# Altium footprint library standard-case.PcbLib: 285 footprints (part 5 of 18)
Each footprint in its own frame and in the unit in brackets; x right, y up, seen from the top. Pads: shape width x height; smd on the part's side, far side on the other; paste and mask are expansions set on the pad; w line width, h text height; cw(c..) or ccw(c..) is an arc to the next point about the centre after c.
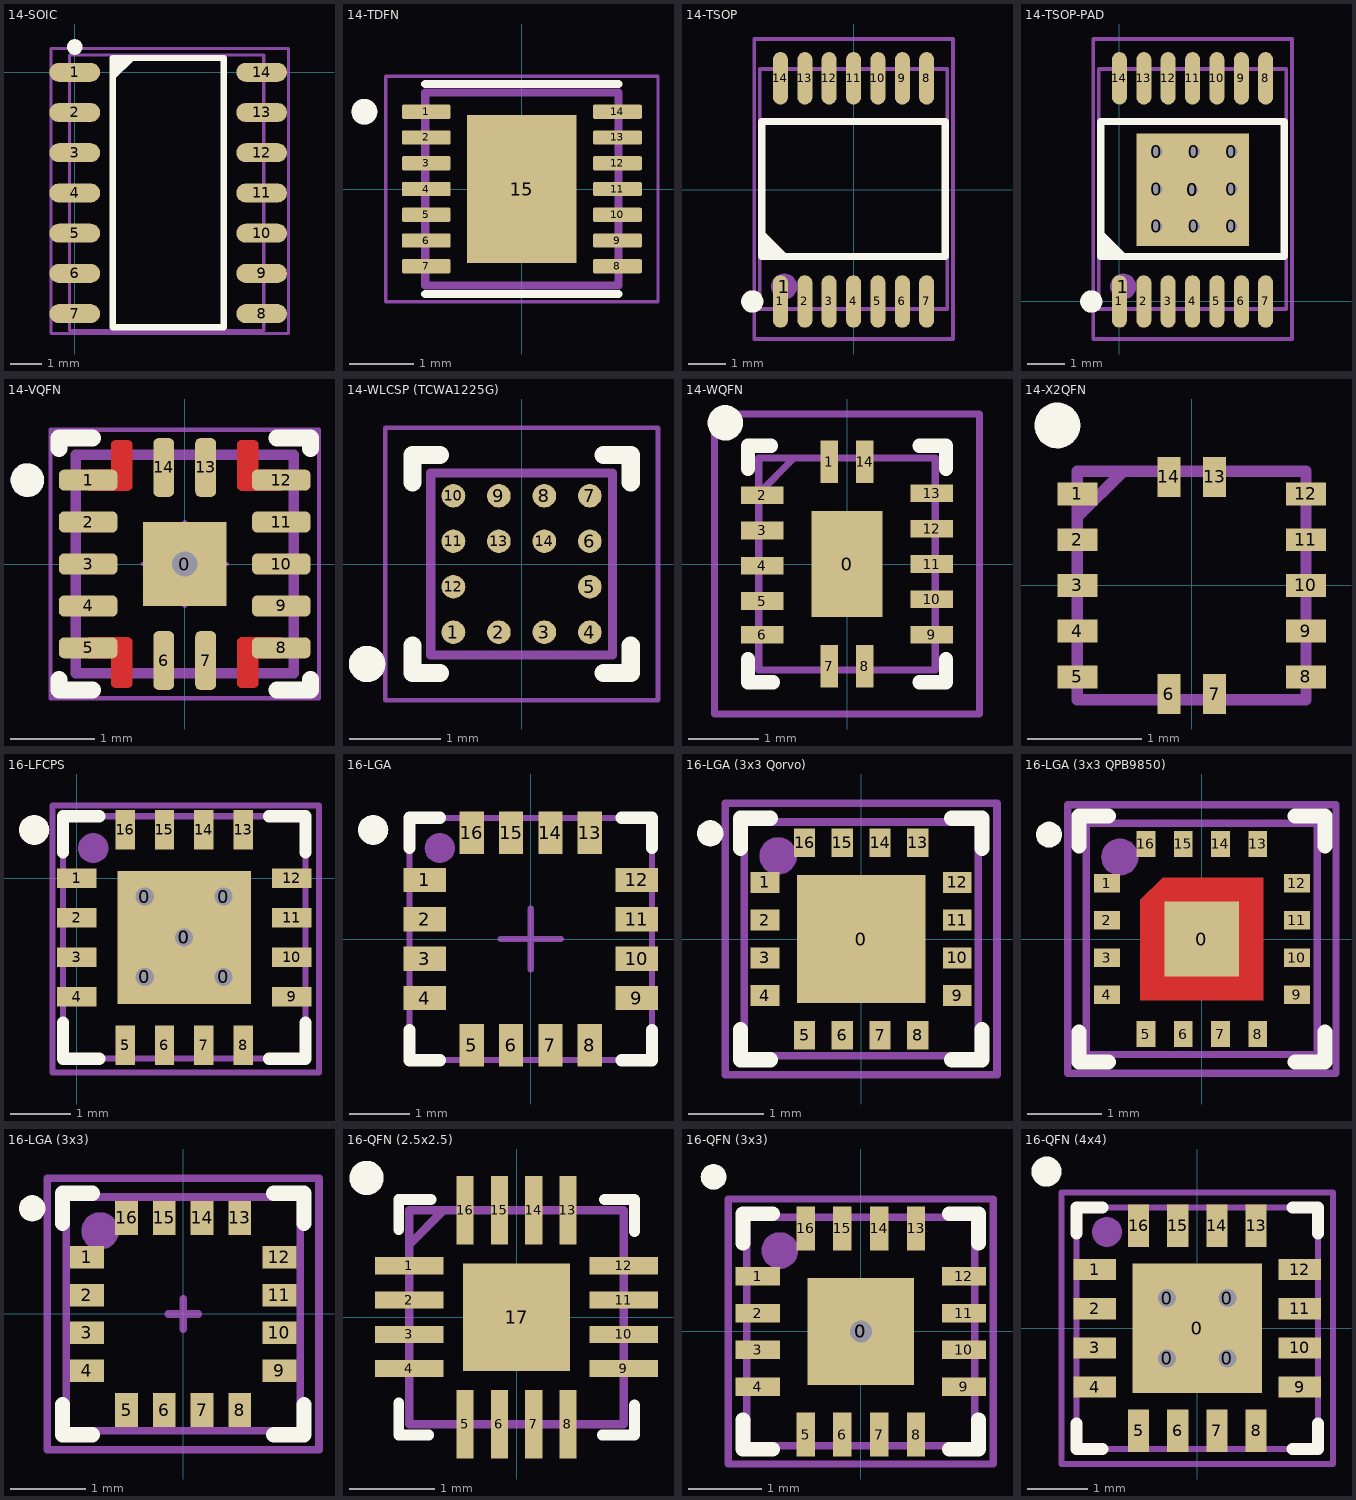
[diagram p4: the footprints below, top view; thin cyan lines are the x and y axes]

## 14-SOIC [mm] "pitch 1.27 mm"
pads (16):
  rrect100% 1.6x0.6 smd: 1(0,0) 2(0,-1.27) 3(0,-2.54) 4(0,-3.81) 5(0,-5.08) 6(0,-6.35) 7(0,-7.62) 8(5.9,-7.62) 9(5.9,-6.35) 10(5.9,-5.08) 11(5.9,-3.81) 12(5.9,-2.54) 13(5.9,-1.27) 14(5.9,0)
  rrect100% 0.5x0.5 on Top Overlay: ""(0,0.8)
  round 0.5 on Mech1: ""(0.5,0)
Top Overlay:
  region: 1.2,0.45 1.2,-0.27 1.92,0.45
  lines w0.2: 1.2,-8.05 4.7,-8.05 4.7,0.45 1.2,0.45 1.2,-8.05
Mechanical 1:
  lines w0.1: -0.168,-8.15 -0.168,0.55 5.969,0.55 5.969,-8.15 -0.168,-8.15
Mechanical 15:
  lines w0.1: -0.75,-8.25 -0.75,0.75 6.75,0.75 6.75,0.5 6.75,-8.25 -0.75,-8.25
3D body "User Library-so14-2.STEP": height 1.78, standoff 0.01, extent -0.118,-8.15 6.019,0.55

## 14-TDFN [mm]
pads (15):
  rrect25% 0.76x0.22 smd: 1(-1.485,1.2) 2(-1.485,0.8) 3(-1.485,0.4) 4(-1.485,0) 5(-1.485,-0.4) 6(-1.485,-0.8) 7(-1.485,-1.2) 8(1.485,-1.2) 9(1.485,-0.8) 10(1.485,-0.4) 11(1.485,0) 12(1.485,0.4) 13(1.485,0.8) 14(1.485,1.2)
  rect 1.7x2.3 smd paste-2: 15(0,0)
Top Overlay:
  circle w0.2: c-2.445,1.2 r0.1
  lines w0.127: -1.5,-1.63 1.5,-1.63 ; -1.5,1.63 1.5,1.63
Top Paste:
  region: 0.54,-0.73 -0.54,-0.73 -0.54,0.73 0.54,0.73
Mechanical 13:
  circle w0.2: c-2.445,1.2 r0.1
  lines w0.127: -1.5,-1.5 1.5,-1.5 1.5,1.5 -1.5,1.5 -1.5,-1.5
Mechanical 15:
  lines w0.05: -2.115,-1.75 2.115,-1.75 2.115,1.75 -2.115,1.75 -2.115,-1.75
3D body "TDFN.STEP": height 0.8, standoff 0, extent -1.5,-1.5 1.5,1.5

## 14-TSOP [mm]
pads (16):
  rrect100% 0.4x1.4 smd: 1(-1.95,-2.975) 2(-1.3,-2.975) 3(-0.65,-2.975) 4(0,-2.975) 5(0.65,-2.975) 6(1.3,-2.975) 7(1.95,-2.975) 8(1.95,2.975) 9(1.3,2.975) 10(0.65,2.975) 11(0,2.975) 12(-0.65,2.975) 13(-1.3,2.975) 14(-1.95,2.975)
  round 0.7 on Mech1: 1(-1.85,-2.575)
  round 0.6 on Top Overlay: ""(-2.7,-2.975)
Top Overlay:
  region: -2.45,-1.775 -1.73,-1.775 -2.45,-1.055
  lines w0.2: -2.45,-1.775 2.45,-1.775 2.45,1.825 -2.45,1.825 -2.45,-1.775
Mechanical 1:
  lines w0.1: -2.5,3.225 2.5,3.225 2.5,-3.175 -2.5,-3.175 -2.5,3.225 ; -2.5,3.225 -2.5,3.225
Mechanical 15:
  lines w0.1: -2.65,-3.975 2.65,-3.975 2.65,-0.575 2.65,4.025 -2.65,4.025 -2.65,-3.975
3D body "SW3dPS-TSSOP14-1.STEP": height 1.1, standoff 0, extent -2.5,-3.175 2.5,3.225

## 14-TSOP-PAD [mm] "pitch 0.65 mm, power pad"
pads (26):
  round 0.7 hole 0.3: 0(1,2) 0(1,3) 0(1,4) 0(1.95,2.975) 0(2,2) 0(2,4) 0(3,2) 0(3,3) 0(3,4)
  rect 3x3 smd: 0(1.95,2.975)
  rrect100% 0.4x1.4 smd: 1(0,0) 2(0.65,0) 3(1.3,0) 4(1.95,0) 5(2.6,0) 6(3.25,0) 7(3.9,0) 8(3.9,5.95) 9(3.25,5.95) 10(2.6,5.95) 11(1.95,5.95) 12(1.3,5.95) 13(0.65,5.95) 14(0,5.95)
  round 0.7 on Mech1: 1(0.1,0.4)
  round 0.6 on Top Overlay: ""(-0.75,0)
Top Overlay:
  region: -0.5,1.2 0.22,1.2 -0.5,1.92
  lines w0.2: -0.5,1.2 4.4,1.2 4.4,4.8 -0.5,4.8 -0.5,1.2
Mechanical 1:
  lines w0.1: -0.55,6.2 -0.55,6.2 ; -0.55,6.2 4.45,6.2 4.45,-0.2 -0.55,-0.2 -0.55,6.2
Mechanical 15:
  lines w0.1: -0.7,-1 -0.7,7 4.6,7 4.6,2.4 4.6,-1 -0.7,-1
3D body "SW3dPS-TSSOP14-1.STEP": height 1.1, standoff 0, extent -0.55,-0.2 4.45,6.2

## 14-VQFN [mm]
pads (15):
  rect 1x1 smd: 0(0,0)
  rrect50% 0.7x0.25 smd: 1(-1.15,1) 2(-1.15,0.5) 3(-1.15,0) 4(-1.15,-0.5) 5(-1.15,-1) 8(1.15,-1) 9(1.15,-0.5) 10(1.15,0) 11(1.15,0.5) 12(1.15,1)
  rrect50% 0.25x0.7 smd: 6(-0.25,-1.15) 7(0.25,-1.15) 13(0.25,1.15) 14(-0.25,1.15)
via 0,0 diameter 0.6 hole 0.3
Top Layer:
  region: 1.15,-0.875 0.675,-0.875 0.665,-0.875 0.647,-0.883 0.633,-0.897 0.625,-0.915 0.625,-0.925 0.625,-1.425 0.625,-1.435 0.633,-1.453 0.647,-1.467 0.665,-1.475 0.675,-1.475 0.825,-1.475 0.835,-1.475 0.853,-1.467 0.867,-1.453 0.875,-1.435 0.875,-1.425 0.875,-1.125 1.15,-1.125
  region: -1.15,-0.875 -0.675,-0.875 -0.665,-0.875 -0.647,-0.883 -0.633,-0.897 -0.625,-0.915 -0.625,-0.925 -0.625,-1.425 -0.625,-1.435 -0.633,-1.453 -0.647,-1.467 -0.665,-1.475 -0.675,-1.475 -0.825,-1.475 -0.835,-1.475 -0.853,-1.467 -0.867,-1.453 -0.875,-1.435 -0.875,-1.425 -0.875,-1.125 -1.15,-1.125
  region: 1.15,0.875 0.675,0.875 0.665,0.875 0.647,0.883 0.633,0.897 0.625,0.915 0.625,0.925 0.625,1.425 0.625,1.435 0.633,1.453 0.647,1.467 0.665,1.475 0.675,1.475 0.825,1.475 0.835,1.475 0.853,1.467 0.867,1.453 0.875,1.435 0.875,1.425 0.875,1.125 1.15,1.125
  region: -1.15,0.875 -0.675,0.875 -0.665,0.875 -0.647,0.883 -0.633,0.897 -0.625,0.915 -0.625,0.925 -0.625,1.425 -0.625,1.435 -0.633,1.453 -0.647,1.467 -0.665,1.475 -0.675,1.475 -0.825,1.475 -0.835,1.475 -0.853,1.467 -0.867,1.453 -0.875,1.435 -0.875,1.425 -0.875,1.125 -1.15,1.125
Top Overlay:
  circle w0.2: c-1.875,1 r0.1
  lines w0.2: -1.5,-1.375 -1.5,-1.5 -1.1,-1.5 ; -1.5,1.375 -1.5,1.5 -1.1,1.5 ; 1.1,-1.5 1.5,-1.5 1.5,-1.375 ; 1.1,1.5 1.5,1.5 1.5,1.375
Mechanical 1:
  circle w0.2: c-1.875,1 r0.1
Top Courtyard:
  lines w0.05: -0.5,0 0.5,0 ; 0,-0.5 0,0.5
Mechanical 13:
  lines w0.127: -1.3,-1.3 -1.3,1.3 1.3,1.3 1.3,-1.3 -1.3,-1.3
Mechanical 15:
  lines w0.05: -1.6,-1.6 1.6,-1.6 1.6,1.6 -1.6,1.6 -1.6,-1.6
3D body "LMQ66430R5RXBR--3DModel-STEP-56544.STEP": height 1.05, standoff 0, extent -1.3,-1.3 1.3,1.3

## 14-WLCSP (TCWA1225G) [mm]
pads (14):
  round 0.26 smd: 1(-0.75,-0.75) 2(-0.25,-0.75) 3(0.25,-0.75) 4(0.75,-0.75) 5(0.75,-0.25) 6(0.75,0.25) 7(0.75,0.75) 8(0.25,0.75) 9(-0.25,0.75) 10(-0.75,0.75) 11(-0.75,0.25) 12(-0.75,-0.25) 13(-0.25,0.25) 14(0.25,0.25)
Top Overlay:
  circle w0.2: c-1.7,-1.1 r0.1
  lines w0.2: -1.2,-0.9 -1.2,-1.2 -0.9,-1.2 ; -1.2,0.9 -1.2,1.2 -0.9,1.2 ; 0.9,-1.2 1.2,-1.2 1.2,-0.9 ; 0.9,1.2 1.2,1.2 1.2,0.9
Mechanical 13:
  lines w0.1: -1,-1 -1,1 1,1 1,-1 -1,-1
Mechanical 15:
  lines w0.05: -1.5,-1.5 1.5,-1.5 1.5,1.5 -1.5,1.5 -1.5,-1.5
3D body "14-WLCSP(TCWA1225G).STEP": height 0.5, standoff -0.01, extent -0.95,-0.95 0.95,0.95

## 14-WQFN [mm]
pads (15):
  rect 1x1.5 smd mask+0.07: 0(0,0)
  rect 0.25x0.6 smd mask+0.07: 1(-0.25,1.45) 7(-0.25,-1.45) 8(0.25,-1.45) 14(0.25,1.45)
  rect 0.6x0.25 smd mask+0.07: 2(-1.2,0.975) 3(-1.2,0.475) 4(-1.2,-0.025) 5(-1.2,-0.525) 6(-1.2,-1) 9(1.2,-1) 10(1.2,-0.5) 11(1.2,0) 12(1.2,0.5) 13(1.2,1)
Top Overlay:
  circle w0.25: c-1.725,2 r0.125
  lines w0.2: -1.4,-1.675 -1.4,-1.35 ; -1.4,1.35 -1.4,1.675 -1.075,1.675 ; -1.375,-1.675 -1.05,-1.675 ; 1.025,-1.675 1.35,-1.675 ; 1.025,1.675 1.35,1.675 ; 1.4,-1.675 1.4,-1.35 ; 1.4,1.35 1.4,1.675
Mechanical 13:
  lines w0.1: -1.25,1 -0.75,1.5 ; -1.25,-1.5 1.25,-1.5 1.25,1.5 -1.25,1.5 -1.25,-1.5
Mechanical 15:
  lines w0.1: -1.875,-2.125 1.875,-2.125 1.875,2.125 -1.875,2.125 -1.875,-2.125
3D body "WQFN-14.STEP": height 0.8, standoff 0, extent -1.25,-1.5 1.25,1.5

## 14-X2QFN [mm] "2x2x0.4"
pads (14):
  rect 0.35x0.2 smd: 1(-1,0.8) 2(-1,0.4) 3(-1,0) 4(-1,-0.4) 5(-1,-0.8) 8(1,-0.8) 9(1,-0.4) 10(1,0) 11(1,0.4) 12(1,0.8)
  rect 0.2x0.35 smd: 6(-0.2,-0.95) 7(0.2,-0.95) 13(0.2,0.95) 14(-0.2,0.95)
Top Overlay:
  circle w0.2: c-1.175,1.4 r0.1
Mechanical 15:
  lines w0.1: -1,0.6 -0.6,1 ; -1,-1 -1,1 1,1 1,-1 -1,-1
3D body "TLV9054IRUCR.stp": height 0.4, standoff 0, extent -1,-1 1,1

## 16-LFCPS [mm] "4x4 mm, pitch 0.65 mm"
height 0.9
pads (24):
  round 0.7 hole 0.3: 0(1.125,-1.625) 0(1.125,-0.3) 0(1.775,-0.975) 0(2.425,-1.625) 0(2.425,-0.3)
  rect 2.2x2.2 smd: 0(1.775,-0.975)
  rect 0.65x0.32 smd: 1(0,0) 2(0,-0.65) 3(0,-1.3) 4(0,-1.95) 9(3.55,-1.95) 10(3.55,-1.3) 11(3.55,-0.65) 12(3.55,0)
  rect 0.32x0.65 smd: 5(0.8,-2.75) 6(1.45,-2.75) 7(2.1,-2.75) 8(2.75,-2.75) 13(2.75,0.8) 14(2.1,0.8) 15(1.45,0.8) 16(0.8,0.8)
  round 0.5 on Top Overlay: ""(-0.7,0.8)
  round 0.5 on Mech1: ""(0.275,0.5)
Top Overlay:
  lines w0.2: -0.225,-2.375 -0.225,-2.975 0.375,-2.975 ; -0.225,0.425 -0.225,1.025 0.375,1.025 ; 3.175,-2.975 3.775,-2.975 3.775,-2.375 ; 3.175,1.025 3.775,1.025 3.775,0.425
Mechanical 1:
  lines w0.1: -0.225,-2.975 3.775,-2.975 3.775,1.025 -0.225,1.025 -0.225,-2.975
Mechanical 15:
  lines w0.1: -0.4,-3.2 -0.4,1.2 4,1.2 4,-3.2 -0.4,-3.2
3D body "User Library-qfn16-4x4No pad.STEP": height 0.92, standoff 0, extent -0.225,-2.975 3.775,1.025

## 16-LGA [mm] "4x4 mm, pitch 0.65 mm"
height 1
pads (18):
  rect 0.7x0.4 smd: 1(-1.75,0.975) 2(-1.75,0.325) 3(-1.75,-0.325) 4(-1.75,-0.975) 9(1.75,-0.975) 10(1.75,-0.325) 11(1.75,0.325) 12(1.75,0.975)
  rect 0.4x0.7 smd: 5(-0.975,-1.75) 6(-0.325,-1.75) 7(0.325,-1.75) 8(0.975,-1.75) 13(0.975,1.75) 14(0.325,1.75) 15(-0.325,1.75) 16(-0.975,1.75)
  round 0.5 on Top Overlay: ""(-2.6,1.8)
  round 0.5 on Mech1: ""(-1.5,1.5)
Top Overlay:
  lines w0.2: -2,-1.5 -2,-2 -1.5,-2 ; -2,1.5 -2,2 -1.5,2 ; 1.5,-2 2,-2 2,-1.5 ; 1.5,2 2,2 2,1.5
Mechanical 1:
  lines w0.1: -2,-2 -2,2 2,2 2,-2 -2,-2
Mechanical 15:
  lines w0.1: -0.5,0 0.5,0 ; 0,-0.5 0,0.5 ; -2,-2 -2,2 2,2 2,-2 -2,-2
3D body "User Library-LGA-16.step": height 0.98, standoff 0, extent -2,-2 2,2

## 16-LGA (3x3 Qorvo) [mm] "3x3 mm, pitch 0.5 mm"
height 0.75
pads (19):
  rect 1.7x1.7 smd paste-2539.97 mask+0.05: 0(0,0)
  rect 0.38x0.28 smd mask+0.05: 1(-1.275,0.75) 2(-1.275,0.25) 3(-1.275,-0.25) 4(-1.275,-0.75) 9(1.275,-0.75) 10(1.275,-0.25) 11(1.275,0.25) 12(1.275,0.75)
  rect 0.28x0.38 smd mask+0.05: 5(-0.75,-1.275) 6(-0.25,-1.275) 7(0.25,-1.275) 8(0.75,-1.275) 13(0.75,1.275) 14(0.25,1.275) 15(-0.25,1.275) 16(-0.75,1.275)
  round 0.35 on Top Overlay: ""(-2,1.4)
  round 0.5 on Mech1: ""(-1.1,1.1)
Top Overlay:
  lines w0.2: -1.6,-1.2 -1.6,-1.6 -1.2,-1.6 ; -1.6,1.2 -1.6,1.6 -1.2,1.6 ; 1.2,-1.6 1.6,-1.6 1.6,-1.2 ; 1.2,1.6 1.6,1.6 1.6,1.2
Top Paste:
  region: -0.7,0.7 -0.7,0.1 -0.1,0.1 -0.1,0.7
  region: 0.1,0.7 0.1,0.1 0.7,0.1 0.7,0.7
  region: -0.7,-0.1 -0.7,-0.7 -0.1,-0.7 -0.1,-0.1
  region: 0.1,-0.1 0.1,-0.7 0.7,-0.7 0.7,-0.1
Mechanical 1:
  lines w0.1: -1.55,-1.55 -1.55,1.55 1.55,1.55 1.55,-1.55 -1.55,-1.55
Mechanical 15:
  lines w0.1: -0.2,0 0.2,0 ; 0,-0.2 0,0.2 ; -1.8,-1.8 1.8,-1.8 1.8,1.8 -1.8,1.8 -1.8,-1.8
3D body "User Library-QFN-16.STEP": height 0.9, standoff 0, extent -1.501,-1.501 1.501,1.501

## 16-LGA (3x3 QPB9850) [mm] "3x3 mm, pitch 0.5 mm"
height 0.75
pads (19):
  rect 1x1 smd paste-2539.97 mask+0.05: 0(0,0)
  rect 0.35x0.25 smd mask+0.05: 1(-1.275,0.75) 2(-1.275,0.25) 3(-1.275,-0.25) 4(-1.275,-0.75) 9(1.275,-0.75) 10(1.275,-0.25) 11(1.275,0.25) 12(1.275,0.75)
  rect 0.25x0.35 smd mask+0.05: 5(-0.75,-1.275) 6(-0.25,-1.275) 7(0.25,-1.275) 8(0.75,-1.275) 13(0.75,1.275) 14(0.25,1.275) 15(-0.25,1.275) 16(-0.75,1.275)
  round 0.35 on Top Overlay: ""(-2.05,1.4)
  round 0.5 on Mech1: ""(-1.1,1.1)
Top Layer:
  region: -0.825,0.525 -0.825,-0.825 0.825,-0.825 0.825,0.825 -0.525,0.825
Top Overlay:
  lines w0.2: -1.65,-1.25 -1.65,-1.65 -1.25,-1.65 ; -1.65,1.25 -1.65,1.65 -1.25,1.65 ; 1.25,-1.65 1.65,-1.65 1.65,-1.25 ; 1.25,1.65 1.65,1.65 1.65,1.25
Top Paste:
  region: 0.075,-0.075 0.075,-0.725 0.725,-0.725 0.725,-0.075
  region: -0.725,-0.075 -0.725,-0.725 -0.075,-0.725 -0.075,-0.075
  region: 0.075,0.725 0.075,0.075 0.725,0.075 0.725,0.725
  region: -0.725,0.475 -0.725,0.075 -0.075,0.075 -0.075,0.725 -0.475,0.725
Mechanical 1:
  lines w0.1: -1.55,-1.55 1.55,-1.55 1.55,1.55 -1.55,1.55 -1.55,-1.55
Mechanical 15:
  lines w0.1: -0.2,0 0.2,0 ; 0,-0.2 0,0.2 ; -1.8,-1.8 -1.8,1.8 1.8,1.8 1.8,-1.8 -1.8,-1.8
3D body "User Library-QFN-16.STEP": height 0.9, standoff 0, extent -1.501,-1.501 1.501,1.501

## 16-LGA (3x3) [mm] "3x3 mm, pitch 0.5 mm"
height 0.75
pads (18):
  rect 0.45x0.3 smd: 1(-1.275,0.75) 2(-1.275,0.25) 3(-1.275,-0.25) 4(-1.275,-0.75) 9(1.275,-0.75) 10(1.275,-0.25) 11(1.275,0.25) 12(1.275,0.75)
  rect 0.3x0.45 smd: 5(-0.75,-1.275) 6(-0.25,-1.275) 7(0.25,-1.275) 8(0.75,-1.275) 13(0.75,1.275) 14(0.25,1.275) 15(-0.25,1.275) 16(-0.75,1.275)
  round 0.35 on Top Overlay: ""(-2,1.4)
  round 0.5 on Mech1: ""(-1.1,1.1)
Top Overlay:
  lines w0.2: -1.6,-1.2 -1.6,-1.6 -1.2,-1.6 ; -1.6,1.2 -1.6,1.6 -1.2,1.6 ; 1.2,-1.6 1.6,-1.6 1.6,-1.2 ; 1.2,1.6 1.6,1.6 1.6,1.2
Mechanical 1:
  lines w0.1: -1.55,-1.55 1.55,-1.55 1.55,1.55 -1.55,1.55 -1.55,-1.55
Mechanical 15:
  lines w0.1: -0.2,0 0.2,0 ; 0,-0.2 0,0.2 ; -1.8,-1.8 -1.8,1.8 1.8,1.8 1.8,-1.8 -1.8,-1.8
3D body "User Library-QFN-16.STEP": height 0.9, standoff 0, extent -1.501,-1.501 1.501,1.501

## 16-QFN (2.5x2.5) [mm] "2.5x2.5 mm, pitch 0.4 mm"
height 0.75
pads (17):
  rect 0.8x0.2 smd: 1(-1.25,0.6) 2(-1.25,0.2) 3(-1.25,-0.2) 4(-1.25,-0.6) 9(1.25,-0.6) 10(1.25,-0.2) 11(1.25,0.2) 12(1.25,0.6)
  rect 0.2x0.8 smd: 5(-0.6,-1.25) 6(-0.2,-1.25) 7(0.2,-1.25) 8(0.6,-1.25) 13(0.6,1.25) 14(0.2,1.25) 15(-0.2,1.25) 16(-0.6,1.25)
  rect 1.25x1.25 smd: 17(0,0)
Top Overlay:
  lines w0.127: -1.375,-1 -1.375,-1.375 -1.025,-1.375 ; -1.375,1.025 -1.375,1.375 -1,1.375 ; 1,-1.375 1.375,-1.375 1.375,-1.025 ; 1.025,1.375 1.375,1.375 1.375,1
  lines w0.2: -1.65,1.625 cw(c-1.75,1.625) -1.65,1.633
Mechanical 15:
  lines w0.1: -1.25,0.85 -0.85,1.25 ; -1.25,-1.25 -1.25,1.25 1.25,1.25 1.25,-1.25 -1.25,-1.25
3D body "X1QFN-16.STEP": height 0.5, standoff 0, extent -1.25,-1.25 1.25,1.25

## 16-QFN (3x3) [mm] "3x3 mm, pitch 0.5 mm"
height 0.75
pads (20):
  rect 1.45x1.45 smd: 0(0,0)
  round 0.7 hole 0.3: 0(0,0)
  rect 0.6x0.25 smd: 1(-1.4,0.75) 2(-1.4,0.25) 3(-1.4,-0.25) 4(-1.4,-0.75) 9(1.4,-0.75) 10(1.4,-0.25) 11(1.4,0.25) 12(1.4,0.75)
  rect 0.25x0.6 smd: 5(-0.75,-1.4) 6(-0.25,-1.4) 7(0.25,-1.4) 8(0.75,-1.4) 13(0.75,1.4) 14(0.25,1.4) 15(-0.25,1.4) 16(-0.75,1.4)
  round 0.35 on Top Overlay: ""(-2,2.1)
  round 0.5 on Mech1: ""(-1.1,1.1)
Top Overlay:
  lines w0.2: -1.6,-1.2 -1.6,-1.6 -1.2,-1.6 ; -1.6,1.2 -1.6,1.6 -1.2,1.6 ; 1.2,-1.6 1.6,-1.6 1.6,-1.2 ; 1.2,1.6 1.6,1.6 1.6,1.2
Mechanical 1:
  lines w0.1: -1.55,-1.55 1.55,-1.55 1.55,1.55 -1.55,1.55 -1.55,-1.55
Mechanical 15:
  lines w0.1: -0.2,0 0.2,0 ; 0,-0.2 0,0.2 ; -1.8,-1.8 -1.8,1.8 1.8,1.8 1.8,-1.8 -1.8,-1.8
3D body "User Library-QFN-16.STEP": height 0.9, standoff 0, extent -1.501,-1.501 1.501,1.501

## 16-QFN (4x4) [mm] "4x4 mm, pitch 0.65 mm"
height 0.75
pads (22):
  round 0.7 hole 0.3: 0(-0.5,-0.5) 0(-0.5,0.5) 0(0.5,-0.5) 0(0.5,0.5)
  rect 2.15x2.15 smd: 0(0,0)
  rect 0.7x0.35 smd: 1(-1.7,0.975) 2(-1.7,0.325) 3(-1.7,-0.325) 4(-1.7,-0.975) 9(1.7,-0.975) 10(1.7,-0.325) 11(1.7,0.325) 12(1.7,0.975)
  rect 0.35x0.7 smd: 5(-0.975,-1.7) 6(-0.325,-1.7) 7(0.325,-1.7) 8(0.975,-1.7) 13(0.975,1.7) 14(0.325,1.7) 15(-0.325,1.7) 16(-0.975,1.7)
  round 0.5 on Mech1: ""(-1.5,1.6)
Top Overlay:
  circle w0.25: c-2.5,2.6 r0.125
  lines w0.2: -2,-1.575 -2,-2 -1.575,-2 ; -2,1.575 -2,2 -1.575,2 ; 1.575,-2 2,-2 2,-1.575 ; 1.575,2 2,2 2,1.575
Mechanical 1:
  lines w0.1: -2,-2 2,-2 2,2 -2,2 -2,-2
Mechanical 15:
  lines w0.1: -0.5,0 0.5,0 ; 0,-0.5 0,0.5 ; -2.25,-2.25 2.25,-2.25 2.25,2.25 -2.25,2.25 -2.25,-2.25
3D body "16-QFN (4x4).step": height 0.75, standoff 0, extent -2,-2 2,2